# Altium integrated library Terminal 8 Pin THT 3.81mm.IntLib: 1 symbol
Pins are listed as number, name and electrical type; pins without a type are passive.

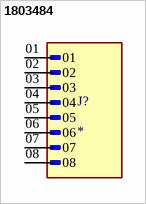
[diagram p0: symbol 1803484]

## 1803484
designator J?
MF: {'manufacturer': u'Phoenix Contact'}; MP: 1803484; Package: None; Price: None; Value: *; Availability: Unavailable
footprint PHOENIX_1803484
pins: 01, 02, 03, 04, 05, 06, 07, 08